# Altium integrated library 22uF_10V.IntLib: 1 symbol
Pins are listed as number, name and electrical type; pins without a type are passive.

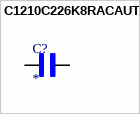
[diagram p0: symbol C1210C226K8RACAUTO]

## C1210C226K8RACAUTO
designator C?
22 ÂµF Â±10% 10V Ceramic Capacitor X7R 1210 (3225 Metric); MF: KEMET; MP: C1210C226K8RACAUTO; SnapEDA_Link: https://www.snapeda.com/parts/C1210C226K8RACAUTO/Kemet/view-part/?ref=snap; Package: 1210-2 KEMET; Value: *; Check_prices: https://www.snapeda.com/parts/C1210C226K8RACAUTO/Kemet/view-part/?ref=eda
footprint CAPC3225X280N
pins: 1, 2